# Altium schematic symbol library RK3566_.SCHLIB: 107 symbols (part 3 of 3)
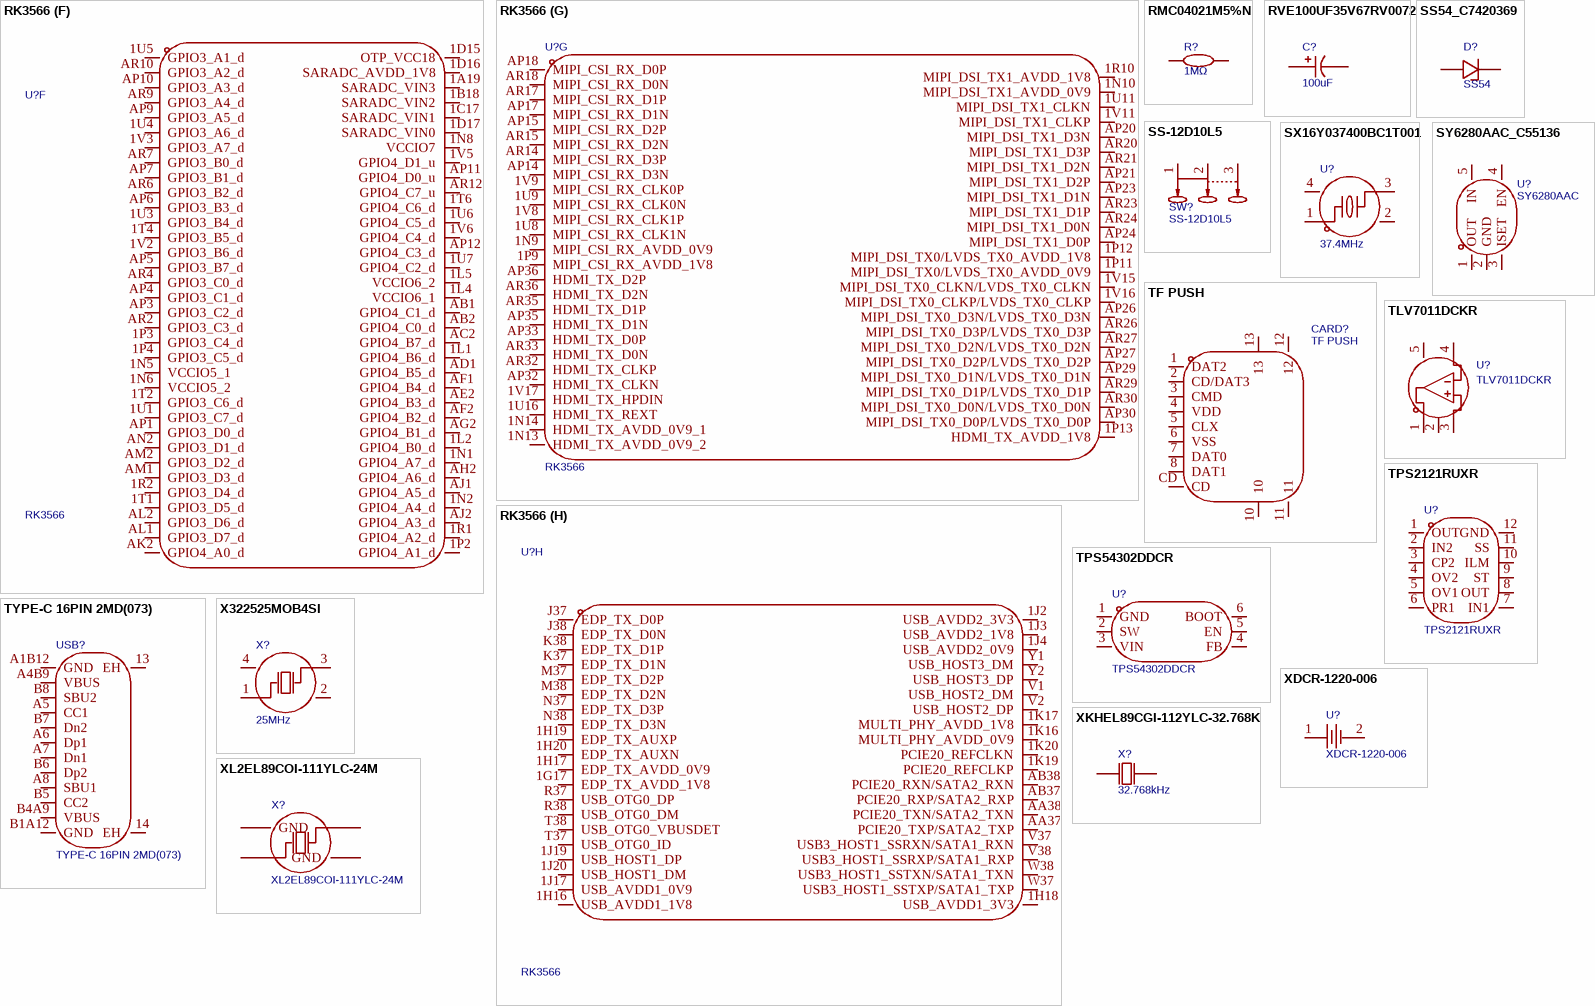
[diagram p6: symbols RK3566 to XL2EL89COI-111YLC-24M]

## TPS2121RUXR
designator U?
TPS2121 支持无缝切换的 2.7V 至 22V、56mΩ、4.5A 电源多路复用器; Manufacturer: TI(德州仪器); AddInBom: yes; ModelId: 23ed45b0241644698956addf625daed0聨0819f05c4eef4c71ace90d822a990e87; ModelName: VQFN-HR-12_L2.5-W2.0-H1.0-P0.50-BL; ModelTransform: 78.74,98.425,0,90,0,0,-0.004,0.002,0; Symbol: TPS2121RUXR; Device: TPS2121RUXR; LCSC Part Name: TPS2121RUXR; SupplierPart: C485916; ManufacturerPart: TPS2121RUXR; Supplier Footprint: VQFN-HR-12(2x2.5); JLCPCB Part Class: Extended Part; Datasheet: https://www.ti.com/cn/lit/gpn/tps2121; Supplier: LCSC; ConvertToPcb: yes; FootprintName: VQFN-HR-12_L2.5-W2.0-P0.50-BL
footprint VQFN-HR-12_L2.5-W2.0-P0.50-BL
pins: 1 OUT, 2 IN2, 3 CP2, 4 OV2, 5 OV1, 6 PR1, 7 IN1, 8 OUT, 9 ST, 10 ILM, 11 SS, 12 GND

## TPS54302DDCR
designator U?
功能类型:降压型;工作电压:4.5V~28V;输出电压:-;输出电流:3A;输出类型:可调;; Manufacturer: TI(德州仪器); Symbol: TPS54302DDCR_C311983; AddInBom: yes; ModelId: 18da8f6c14a34920b3e136b5c401a119聨0819f05c4eef4c71ace90d822a990e87; ModelName: SOT-23-6_L2.9-W1.6-H1.5-LS2.8-P0.95; ModelTransform: 110.236,113.364,0,90,0,0,0.0005,0.0005,0; Function: 降压型; Output Current: 3A; Frequency - Switching: 400kHz; Synchronous Rectifier: 是; Number of Outputs: 1; Topology: 降压式; Quiescent Current: 45uA; Switch tube (built-in/external): 内置; Output Type: 可调; Device: TPS54302DDCR; LCSC Part Name: 降压型 3A 4.5V~28V; SupplierPart: C311983; ManufacturerPart: TPS54302DDCR; Supplier Footprint: TSOT-23-6; JLCPCB Part Class: Extended Part; Datasheet: https://www.ti.com/cn/lit/ds/symlink/tps54302.pdf; Supplier: LCSC; ConvertToPcb: yes; FootprintName: SOT-23-6_L2.9-W1.6-P0.95-LS2.8-BL; Voltage - Supply: 4.5V~28V; Output Voltage: -; Operating Temperature: -40℃~+125℃@(TJ); Features: 轻载高效模式；逐波限流；过流保护；EMI优化(抖频模式)；打嗝限流
footprint SOT-23-6_L2.9-W1.6-P0.95-LS2.8-BL
pins: 1 GND, 2 SW, 3 VIN, 4 FB, 5 EN, 6 BOOT

## TYPE-C 16PIN 2MD(073)
designator USB?
连接器类型:Type-C;协议标准:-;公母:母;安装方式:卧贴;触点数量:16P;端口数量:1;额定电流 - 电源:3A;工作温度:-25℃~+85℃;; Manufacturer: SHOU HAN(首韩); AddInBom: yes; ModelId: 3a41b9ec9b654a0fad4d118405ec6290聨0819f05c4eef4c71ace90d822a990e87; ModelName: USB-C-SMD_TYPE-C-6PIN-2MD-073; ModelTransform: 351.9678,298.4246,0,0,0,0,0,-47.244,-35.433; Gender: 母; Number of Contacts: 16P; Number of Ports: 1; Current Rating-Power: 3A; Voltage Rating: 5V; Connect-Disconnect Life: 1万次; Detection color: 黑色; Symbol: TYPE-C 16PIN 2MD(073); Device: TYPE-C 16PIN 2MD(073); LCSC Part Name: Type-C 母 卧贴; SupplierPart: C2765186; ManufacturerPart: TYPE-C 16PIN 2MD(073); Supplier Footprint: SMD; JLCPCB Part Class: Extended Part; Datasheet: https://item.szlcsc.com/datasheet/TYPE-C%252016PIN%25202MD(073)/2901843.html; Supplier: LCSC; ConvertToPcb: yes; FootprintName: USB-C-SMD_TYPE-C-16PIN-2MD-073; Connector Type: Type-C; Protocol Standard: -; Mounting Type: 卧贴; Supplementary Features: -; Center Height: -; Length: 7.35mm; Operating Temperature: -25℃~+85℃
footprint USB-C-SMD_TYPE-C-16PIN-2MD-073
pins: 13 EH, 14 EH, A1B12 GND, A4B9 VBUS, A5 CC1, A6 Dp1, A7 Dn1, A8 SBU1, B1A12 GND, B4A9 VBUS, B5 CC2, B6 Dp2, B7 Dn2, B8 SBU2

## X322525MOB4SI
designator X?, comment 25MHz
晶振类型:贴片晶振;频率:25MHz;常温频差:±10ppm;负载电容:12pF;频率稳定度:±20ppm;; Manufacturer: YXC(扬兴晶振); Symbol: X322525MOB4SI; AddInBom: yes; ModelId: ff2dfd5650294453a14147960efe1838聨0819f05c4eef4c71ace90d822a990e87; ModelName: CRYSTAL-SMD_4P-L3.2-W2.5-BL; ModelTransform: 125.984,98.425,0,0,0,0,0,0,0; Normal temperature Frequency Tolerance: ±10ppm; Load Capacitance: 12pF; Frequency Stability: ±20ppm; Equivalent Series Resistance(ESR): 50Ω; Device: X322525MOB4SI; LCSC Part Name: YSX321SL 25MHZ 4P 3225 12PF ±10PPM -40~85℃ (±20PPM); SupplierPart: C9006; ManufacturerPart: X322525MOB4SI; Supplier Footprint: SMD3225-4P; JLCPCB Part Class: Basic Part; Datasheet: https://item.szlcsc.com/datasheet/X322525MOB4SI/9526.html; Supplier: LCSC; ConvertToPcb: yes; FootprintName: CRYSTAL-SMD_4P-L3.2-W2.5-BL; Type: 贴片晶振; Value: 25MHz; Operating Temperature: -40℃~+85℃
footprint CRYSTAL-SMD_4P-L3.2-W2.5-BL
pins: 1 OSC1, 2 GND, 3 OSC2, 4 GND

## XDCR-1220-006
designator U?
连接器类型:电池底座;适用电池规格:CR1220;触头材质:-;触头镀层:金;工作温度:-40℃~+85℃;; Manufacturer: LX(连欣科技); AddInBom: yes; ModelId: aa69efc108b9406287881e5b236f6e7a聨0819f05c4eef4c71ace90d822a990e87; ModelName: BAT-SMD_CR1220-2; ModelTransform: 777.81069,586.46209,0,180,0,0,-19.685,0,-31.496; Connector Type: 电池底座; Battery Type: CR1220; Symbol: XDCR-1220-006; Device: XDCR-1220-006; LCSC Part Name: 电池座CR1220贴片式镀金 电池底座配套电池型号：CR1220-3V; SupplierPart: C7498147; ManufacturerPart: XDCR-1220-006; Supplier Footprint: SMD; JLCPCB Part Class: Extended Part; Datasheet: https://item.szlcsc.com/datasheet/XDCR-1220-006/8568589.html; Supplier: LCSC; ConvertToPcb: yes; FootprintName: BAT-SMD_CR1220-2ZX; Contact Material: -; Contact Plating: 金; Operating Temperature: -40℃~+85℃
footprint BAT-SMD_CR1220-2ZX
pins: 1, 2

## XKHEL89CGI-112YLC-32.768K
designator X?, comment 32.768kHz
晶振类型:贴片晶振;频率:32.768kHz;常温频差:±20ppm;负载电容:12.5pF;频率稳定度:-;; Manufacturer: YXC(扬兴晶振); Symbol: XKHEL89CGI-112YLC-32.768K; AddInBom: yes; ModelId: 0ef12d2de4aa45edaecb2da3a0d0b794聨0819f05c4eef4c71ace90d822a990e87; ModelName: CRYSTAL-SMD_2P-L2.0-W1.2; ModelTransform: 78.74,47.244,0,0,0,0,0,0,0; Normal temperature Frequency Tolerance: ±20ppm; Load Capacitance: 12.5pF; Equivalent Series Resistance(ESR): 100kΩ; Device: XKHEL89CGI-112YLC-32.768K; LCSC Part Name: YSX2012SK 32.768KHZ 2P 2012 12.5PF ±20PPM -40~85℃; SupplierPart: C7500573; ManufacturerPart: XKHEL89CGI-112YLC-32.768K; Supplier Footprint: SMD2012-2P; JLCPCB Part Class: Extended Part; Datasheet: https://item.szlcsc.com/datasheet/XKHEL89CGI-112YLC-32.768K/8579117.html; Supplier: LCSC; ConvertToPcb: yes; FootprintName: CRYSTAL-SMD_2P-L2.0-W1.2; Type: 贴片晶振; Value: 32.768kHz; Frequency Stability: -; Operating Temperature: -40℃~+85℃
footprint CRYSTAL-SMD_2P-L2.0-W1.2
pins: 1 OSC1, 2 OSC2

## XL2EL89COI-111YLC-24M
designator X?
频率： 24MHZ 负载： 12PF 频率公差： ±10PPM 工作温度： -40~85℃; Manufacturer: YXC(扬兴晶振); Symbol: X1E000210127000G; Crystal Type: 贴片无源晶振; Load Capacitance: 9pF; Equivalent Series Resistance (ESR): 40Ω; 3D Model: ae22b8d143894765bc8100c37cb6356f; 3D Model Transform: 125.984,98.425,0,0,0,0,0,0,0; AddInBom: yes; ModelName: OSC-SMD_4P-L3.2-W2.5-H1.0; Device: XL2EL89COI-111YLC-24M; Datasheet: https://atta.szlcsc.com/upload/public/pdf/source/20161130/1480474612820.pdf; Operating Temperature: -40℃~+85℃; Value: 24MHz; Frequency Tolerance: ±10ppm; Frequency Stability: -; LCSC Part Name: 24MHZ 12PF ±10PPM YSX321SL; JLCPCB Part Class: Extended Part; Supplier Part: C5444545; Manufacturer Part: XL2EL89COI-111YLC-24M; Supplier Footprint: SMD3225-4P; Supplier: LCSC; ConvertToPcb: yes; FootprintName: OSC-SMD_4P-L3.2-W2.5-BL
footprint OSC-SMD_4P-L3.2-W2.5-BL
3D model OSC-SMD_4P-L3.2-W2.5-H1.0
pins: 1 OSC1, 2 GND, 3 OSC2, 4 GND